# Altium schematic symbol library NTIR_Miscellaneous.SchLib: 2 symbols
Pins are listed as number, name and electrical type; pins without a type are passive.

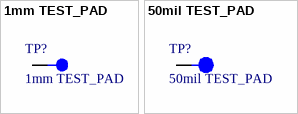
[diagram p0: symbols 1mm TEST_PAD to 50mil TEST_PAD]

## 1mm TEST_PAD
designator TP?
footprint 1mm_TEST_PAD
pins: 1

## 50mil TEST_PAD
designator TP?
footprint 15mil_TEST_PAD
pins: 1